# Altium footprint library DioneyaPWR.PcbLib: 9 footprints
Each footprint in its own frame and in the unit in brackets; x right, y up, seen from the top. Pads: shape width x height; smd on the part's side, far side on the other; paste and mask are expansions set on the pad; w line width, h text height; cw(c..) or ccw(c..) is an arc to the next point about the centre after c.
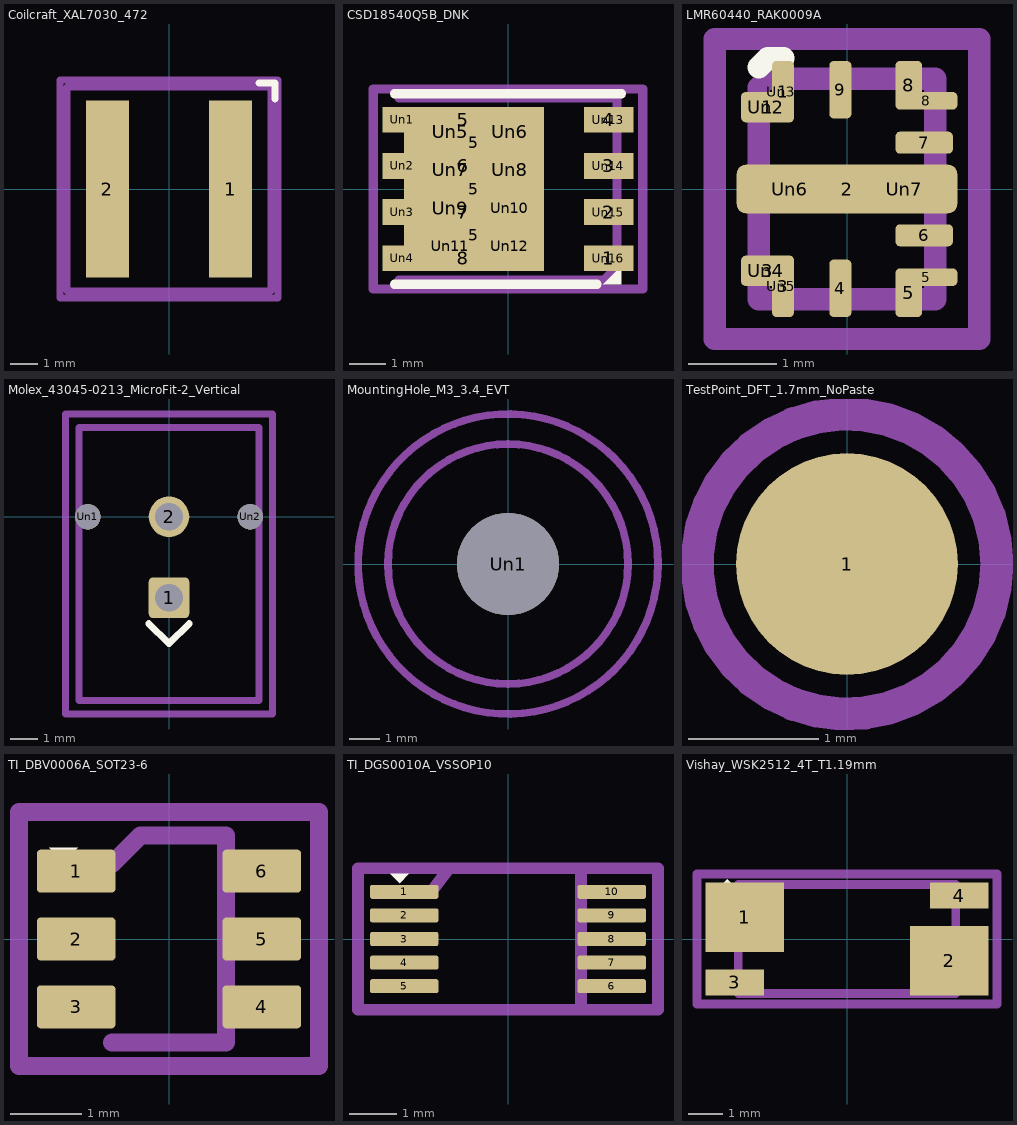
[diagram p0: the footprints below, top view; thin cyan lines are the x and y axes]

## Coilcraft_XAL7030_472 [mm]
pads (2):
  rect 1.58x6.5 smd: 1(2.26,0) 2(-2.26,0)
F.SilkS:
  lines w0.254: 3.3,3.9 3.9,3.9 3.9,3.3
F.Fab:
  lines w0.254: -3.75,-3.75 -3.75,3.75 3.75,3.75 3.75,-3.75 -3.75,-3.75
F.CrtYd:
  lines w0.254: -4,-4 -4,4 4,4 4,-4 -4,-4

## CSD18540Q5B_DNK [mm]
pads (27):
  rect 1.372x0.71 smd: 1(2.77,-1.905) 2(2.77,-0.635) 3(2.77,0.635) 4(2.77,1.905)
  rect 4.44x0.71 smd: 5(-1.236,1.905) 6(-1.236,0.635) 7(-1.236,-0.635) 8(-1.236,-1.905)
  rect 3.85x0.56 smd: 5(-0.941,-1.27) 5(-0.941,0) 5(-0.941,1.27)
  rect 0.766x0.508 on Top Paste: Un1(-2.91,1.905) Un2(-2.91,0.635) Un3(-2.91,-0.635) Un4(-2.91,-1.905)
  rect 1.294x0.746 on Top Paste: Un5(-1.594,1.569) Un6(0.05,1.569) Un7(-1.594,0.523) Un8(0.05,0.523) Un9(-1.594,-0.523) Un10(0.05,-0.523) Un11(-1.594,-1.569) Un12(0.05,-1.569)
  rect 1.072x0.562 on Top Paste: Un13(2.758,1.905) Un14(2.758,0.635) Un15(2.758,-0.635) Un16(2.758,-1.905)
F.SilkS:
  region: 3.12,-2.62 2.62,-2.62 3.12,-2.12
  lines w0.254: -3.12,-2.62 2.45,-2.62 ; -3.12,2.62 3.12,2.62
F.Fab:
  lines w0.254: -3,-2.5 2.65,-2.5 3,-2.15 3,2.5 -3,2.5
F.CrtYd:
  lines w0.254: -3.706,-2.75 -3.706,2.75 3.706,2.75 3.706,-2.75 -3.706,-2.75

## LMR60440_RAK0009A [mm]
pads (20):
  rrect29% 0.6x0.345 smd: 1(-0.9,0.927) 3(-0.9,-0.927)
  rrect40% 0.25x0.695 smd: 1(-0.725,1.102) 3(-0.725,-1.102)
  rrect36% 2.5x0.55 smd: 2(0,0)
  rrect40% 0.25x0.65 smd: 4(-0.075,-1.125) 9(-0.075,1.125)
  rrect33% 0.3x0.55 smd: 5(0.7,-1.175) 8(0.7,1.175)
  rrect50% 0.7x0.2 smd: 5(0.9,-1) 8(0.9,1)
  rrect40% 0.65x0.25 smd: 6(0.875,-0.525) 7(0.875,0.525)
  rect 0.01x0.01 on Top Solder: Un1(0,0)
  rrect29% 0.56x0.345 on Top Paste: Un2(-0.92,0.927) Un4(-0.92,-0.927)
  rrect48% 0.21x0.695 on Top Paste: Un3(-0.745,1.102) Un5(-0.745,-1.102)
  rrect24% 1.1x0.41 on Top Paste: Un6(-0.65,0)
  rrect33% 1.1x0.3 on Top Paste: Un7(0.65,0)
F.SilkS:
  lines w0.254: -1,1.38 -0.9,1.48 -0.72,1.48
F.Mask:
  region: -0.027,0.214 0.037,0.161 0.069,0.15 1.15,0.15 1.2,0.1 1.2,-0.1 1.15,-0.15 0.069,-0.15 0.037,-0.161 -0.027,-0.214 -0.059,-0.225 -1.15,-0.225 -1.2,-0.175 -1.2,0.175 -1.15,0.225 -0.059,0.225
F.Fab:
  lines w0.254: -1,1.15 -1,-1.25 1,-1.25 1,1.25 -0.9,1.25
F.CrtYd:
  lines w0.254: -1.5,-1.7 -1.5,1.7 1.5,1.7 1.5,-1.7 -1.5,-1.7

## Molex_43045-0213_MicroFit-2_Vertical [mm]
pads (4):
  rrect20% 1.5x1.5 hole 1.02: 1(0,-3)
  round 1.5 hole 1.02: 2(0,0)
  round 0.94 hole 0.94: Un1(-3,0) Un2(3,0)
F.SilkS:
  lines w0.254: -0.75,-3.95 0,-4.7 0.75,-3.95
F.Fab:
  lines w0.254: -3.325,-6.8 -3.325,3.3 3.325,3.3 3.325,-6.8 -3.325,-6.8
F.CrtYd:
  lines w0.254: -3.83,-7.3 -3.83,3.8 3.83,3.8 3.83,-7.3 -3.83,-7.3

## MountingHole_M3_3.4_EVT [mm]
pads (1):
  round 3.4 hole 3.4: Un1(0,0)
F.CrtYd:
  circle w0.254: c0,0 r5
Dwgs.User:
  circle w0.254: c0,0 r4

## TestPoint_DFT_1.7mm_NoPaste [mm]
pads (1):
  round 1.7 smd: 1(0,0)
F.CrtYd:
  circle w0.254: c0,0 r1.15

## TI_DBV0006A_SOT23-6 [mm]
pads (6):
  rrect17% 1.1x0.6 smd: 1(-1.3,0.95) 2(-1.3,0) 3(-1.3,-0.95) 4(1.3,-0.95) 5(1.3,0) 6(1.3,0.95)
F.SilkS:
  region: -1.48,1.08 -1.68,1.28 -1.28,1.28
F.Fab:
  lines w0.254: -0.8,-1.45 0.8,-1.45 0.8,1.45 -0.4,1.45 -0.8,1.05
F.CrtYd:
  lines w0.254: -2.1,-1.78 -2.1,1.78 2.1,1.78 2.1,-1.78 -2.1,-1.78

## TI_DGS0010A_VSSOP10 [mm]
pads (10):
  rrect33% 1.45x0.3 smd: 1(-2.2,1) 2(-2.2,0.5) 3(-2.2,0) 4(-2.2,-0.5) 5(-2.2,-1) 6(2.2,-1) 7(2.2,-0.5) 8(2.2,0) 9(2.2,0.5) 10(2.2,1)
F.SilkS:
  region: -2.3,1.18 -2.5,1.38 -2.1,1.38
F.Fab:
  lines w0.254: -1.55,-1.5 1.55,-1.5 1.55,1.5 -1.25,1.5 -1.55,1.1
F.CrtYd:
  lines w0.254: -3.18,-1.5 -3.18,1.5 3.18,1.5 3.18,-1.5 -3.18,-1.5

## Vishay_WSK2512_4T_T1.19mm [mm]
pads (4):
  rect 2.29x2.03 smd: 1(-2.985,0.635) 2(2.985,-0.635)
  rect 1.7x0.76 smd: 3(-3.28,-1.27) 4(3.28,1.27)
F.SilkS:
  region: -3.2,1.45 -3.8,1.45 -3.5,1.75
F.Fab:
  lines w0.254: -3.175,-1.59 -3.175,1.59 3.175,1.59 3.175,-1.59 -3.175,-1.59
F.CrtYd:
  lines w0.254: -4.38,-1.9 -4.38,1.9 4.38,1.9 4.38,-1.9 -4.38,-1.9